# Altium footprint library Borisov.pcblib: 48 footprints (part 3 of 3)
Each footprint in its own frame and in the unit in brackets; x right, y up, seen from the top. Pads: shape width x height; smd on the part's side, far side on the other; paste and mask are expansions set on the pad; w line width, h text height; cw(c..) or ccw(c..) is an arc to the next point about the centre after c.
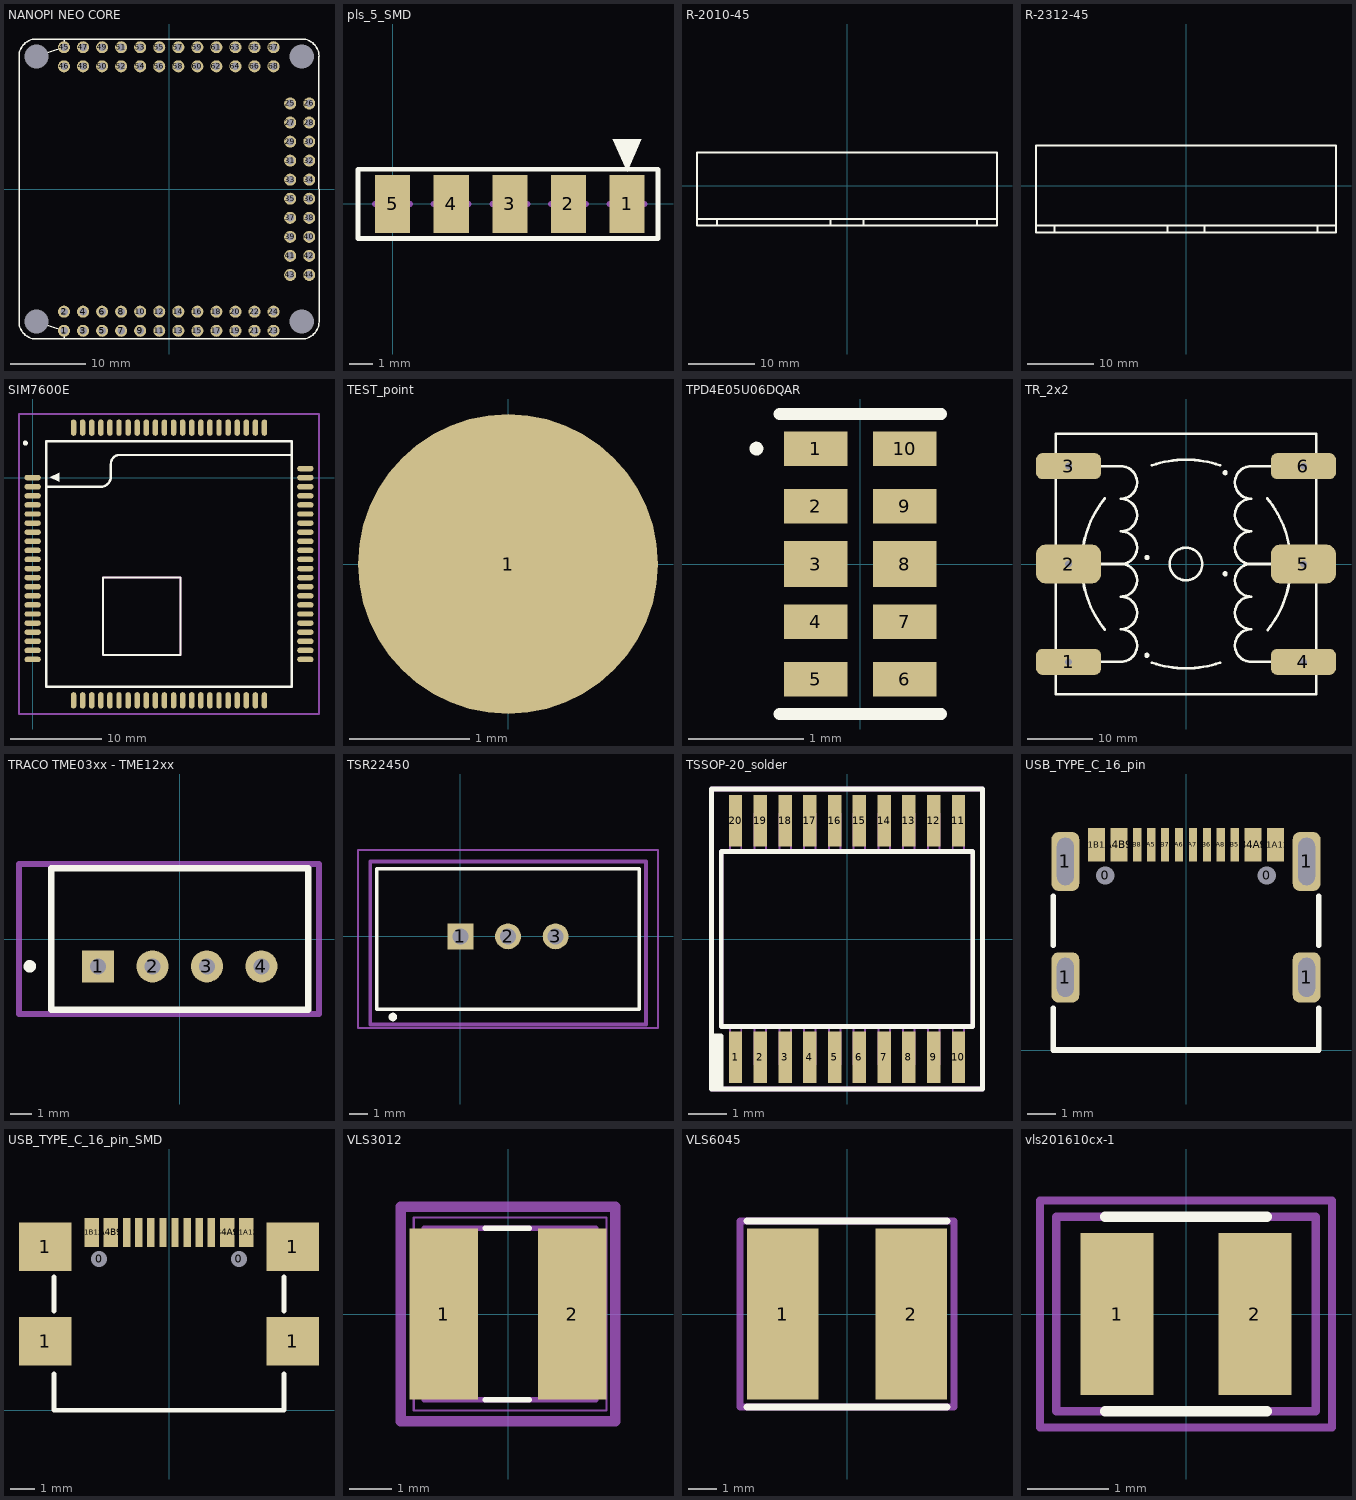
[diagram p2: the footprints below, top view; thin cyan lines are the x and y axes]

## NANOPI NEO CORE [mm]
height 15
pads (72):
  round 0 hole 3.2: 0(-17.7,-17.7) 0(-17.7,17.7) 0(17.7,-17.7) 0(17.7,17.7)
  round 1.6 hole 1: 1(-14,-18.9) 2(-14,-16.36) 3(-11.46,-18.9) 4(-11.46,-16.36) 5(-8.92,-18.9) 6(-8.92,-16.36) 7(-6.38,-18.9) 8(-6.38,-16.36) 9(-3.84,-18.9) 10(-3.84,-16.36) 11(-1.3,-18.9) 12(-1.3,-16.36) 13(1.24,-18.9) 14(1.24,-16.36) 15(3.78,-18.9) 16(3.78,-16.36) 17(6.32,-18.9) 18(6.32,-16.36) 19(8.86,-18.9) 20(8.86,-16.36) 21(11.4,-18.9) 22(11.4,-16.36) 23(13.94,-18.9) 24(13.94,-16.36) 25(16.16,11.4) 26(18.7,11.4) 27(16.16,8.86) 28(18.7,8.86) 29(16.16,6.32) 30(18.7,6.32) 31(16.16,3.78) 32(18.7,3.78) 33(16.16,1.24) 34(18.7,1.24) 35(16.16,-1.3) 36(18.7,-1.3) 37(16.16,-3.84) 38(18.7,-3.84) 39(16.16,-6.38) 40(18.7,-6.38) 41(16.16,-8.92) 42(18.7,-8.92) 43(16.16,-11.46) 44(18.7,-11.46) 45(-14,18.9) 46(-14,16.36) 47(-11.46,18.9) 48(-11.46,16.36) 49(-8.92,18.9) 50(-8.92,16.36) 51(-6.38,18.9) 52(-6.38,16.36) 53(-3.84,18.9) 54(-3.84,16.36) 55(-1.3,18.9) 56(-1.3,16.36) 57(1.24,18.9) 58(1.24,16.36) 59(3.78,18.9) 60(3.78,16.36) 61(6.32,18.9) 62(6.32,16.36) 63(8.86,18.9) 64(8.86,16.36) 65(11.4,18.9) 66(11.4,16.36) 67(13.94,18.9) 68(13.94,16.36)
Top Overlay:
  lines w0.2: -20,-17.8 -20,17.7 cw(c-17.7,17.7) -17.7,20 17.7,20 cw(c17.7,17.7) 20,17.7 20,-17.7 cw(c17.7,-17.7) 17.7,-20 -17.8,-20 ; -20,-17.7 ccw(c-17.7,-17.7) -17.7,-20 ; -17.7,-17.7 -14,-18.9 -14,-19.9 ; -17.7,17.7 -14,18.9 -14,19.97
3D body "Nano Pi Neo Core2.STEP": height 10.24, standoff 5.33, extent -20.372,-20 20,20

## pls_5_SMD [mm]
pads (5):
  rect 1.524x2.5 smd: 1(10.16,0) 2(7.62,0) 3(5.08,0) 4(2.54,0) 5(0,0)
Top Overlay:
  region: 10.16,1.397 10.771,2.794 9.549,2.794
  lines w0.2: -1.5,-1.5 -1.5,1.5 11.5,1.5 11.5,-1.5 -1.5,-1.5
Mechanical 5:
  lines w0.127: -0.305,-0.305 -0.305,0.305 ; -0.305,-0.305 0.305,-0.305 ; -0.305,-0.305 0.305,0.305 ; -0.305,0.305 0.305,0.305 ; -0.305,0.305 0.305,-0.305 ; 0.305,-0.305 0.305,0.305 ; 2.235,-0.305 2.845,0.305 ; 2.235,-0.305 2.845,-0.305 ; 2.235,-0.305 2.235,0.305 ; 2.235,0.305 2.845,-0.305 ; 2.235,0.305 2.845,0.305 ; 2.845,-0.305 2.845,0.305 ; 4.775,-0.305 5.385,0.305 ; 4.775,-0.305 5.385,-0.305 ; 4.775,-0.305 4.775,0.305 ; 4.775,0.305 5.385,-0.305 ; 4.775,0.305 5.385,0.305 ; 5.385,-0.305 5.385,0.305 ; 7.315,-0.305 7.315,0.305 ; 7.315,-0.305 7.925,-0.305 ; 7.315,-0.305 7.925,0.305 ; 7.315,0.305 7.925,0.305 ; 7.315,0.305 7.925,-0.305 ; 7.925,-0.305 7.925,0.305 ; 9.855,-0.305 10.465,0.305 ; 9.855,-0.305 10.465,-0.305 ; 9.855,-0.305 9.855,0.305 ; 9.855,0.305 10.465,-0.305 ; 9.855,0.305 10.465,0.305 ; 10.465,-0.305 10.465,0.305
Mechanical 25:
  lines w0.254: -0.762,0 0.762,0 ; 0,-0.762 0,0.762 ; 1.778,0 3.302,0 ; 2.54,-0.762 2.54,0.762 ; 4.318,0 5.842,0 ; 5.08,-0.762 5.08,0.762 ; 6.858,0 8.382,0 ; 7.62,-0.762 7.62,0.762 ; 9.398,0 10.922,0 ; 10.16,-0.762 10.16,0.762
Mechanical 26:
  lines w0.254: -0.762,0 0.762,0 ; 0,-0.762 0,0.762 ; 1.778,0 3.302,0 ; 2.54,-0.762 2.54,0.762 ; 4.318,0 5.842,0 ; 5.08,-0.762 5.08,0.762 ; 6.858,0 8.382,0 ; 7.62,-0.762 7.62,0.762 ; 9.398,0 10.922,0 ; 10.16,-0.762 10.16,0.762
3D body "PLS-5.step": height 1.59, standoff -0.95, extent -1.27,-10.1 11.43,1.5

## R-2010-45 [mm] "Аллюминиевый радиатор 20x10x45"
Top Overlay:
  lines w0.3: -19.5,-6 -19.5,-5 ; -2.5,-6 -2.5,-5 ; 2.5,-6 2.5,-5 ; 19.5,-6 19.5,-5 ; -22.5,-5 -22.5,-6 22.5,-6 22.5,-5 ; -22.5,-5 -22.5,5 22.5,5 22.5,-5 ; -22.5,-5 22.5,-5
3D body "ceramic_heat-conducting_gasket_17x1x22_TO-220.step": height 22, standoff 0, extent -19.5,-6 -2.5,-5
3D body "ceramic_heat-conducting_gasket_17x1x22_TO-220.step": height 22, standoff 0, extent 2.5,-6 19.5,-5
3D body "R-2010-45.step": height 20, standoff 0, extent -22.5,-5 22.5,5

## R-2312-45 [mm] "Аллюминиевый радиатор 22.77x12x45"
Top Overlay:
  lines w0.3: -19.75,-7 -19.75,-6 ; -2.75,-7 -2.75,-6 ; 2.75,-7 2.75,-6 ; 19.75,-7 19.75,-6 ; -22.5,-6 22.5,-6 ; -22.5,-6 -22.5,6 22.5,6 22.5,-6 ; -22.5,-6 -22.5,-7 22.5,-7 22.5,-6
3D body "R-2312-45.step": height 22, standoff 0, extent -22.5,-6 22.5,5.996
3D body "ceramic_heat-conducting_gasket_17x1x22_TO-220.step": height 22, standoff 0, extent 2.75,-7 19.75,-6
3D body "ceramic_heat-conducting_gasket_17x1x22_TO-220.step": height 22, standoff 0, extent -19.75,-7 -2.75,-6

## SIM7600E [mm] "Multi-Band LTE-TDD/LTE-FDD/HSPA+ and GSM/GPRS/EDGE module"
pads (87):
  oval 1.8x0.6 smd: 1(0,0) 2(0,-1) 3(0,-2) 4(0,-3) 5(0,-4) 6(0,-5) 7(0,-6) 8(0,-7) 9(0,-8) 10(0,-9) 11(0,-10) 12(0,-11) 13(0,-12) 14(0,-13) 15(0,-14) 16(0,-15) 17(0,-16) 18(0,-17) 19(0,-18) 20(0,-19) 41(30,-19) 42(30,-18) 43(30,-17) 44(30,-16) 45(30,-15) 46(30,-14) 47(30,-13) 48(30,-12) 49(30,-11) 50(30,-10) 51(30,-9) 52(30,-8) 53(30,-7) 54(30,-6) 55(30,-5) 56(30,-4) 57(30,-3) 58(30,-2) 59(30,-1) 60(30,0) 81(0,-20) 82(30,-20) 85(30,1)
  oval 0.6x1.8 smd: 21(5.5,-24.5) 22(6.5,-24.5) 23(7.5,-24.5) 24(8.5,-24.5) 25(9.5,-24.5) 26(10.5,-24.5) 27(11.5,-24.5) 28(12.5,-24.5) 29(13.5,-24.5) 30(14.5,-24.5) 31(15.5,-24.5) 32(16.5,-24.5) 33(17.5,-24.5) 34(18.5,-24.5) 35(19.5,-24.5) 36(20.5,-24.5) 37(21.5,-24.5) 38(22.5,-24.5) 39(23.5,-24.5) 40(24.5,-24.5) 61(24.5,5.5) 62(23.5,5.5) 63(22.5,5.5) 64(21.5,5.5) 65(20.5,5.5) 66(19.5,5.5) 67(18.5,5.5) 68(17.5,5.5) 69(16.5,5.5) 70(15.5,5.5) 71(14.5,5.5) 72(13.5,5.5) 73(12.5,5.5) 74(11.5,5.5) 75(10.5,5.5) 76(9.5,5.5) 77(8.5,5.5) 78(7.5,5.5) 79(6.5,5.5) 80(5.5,5.5) 83(25.5,-24.5) 84(4.5,-24.5) 86(4.5,5.5) 87(25.5,5.5)
Top Overlay:
  circle w0.254: c-0.8,3.8 r0.15
  region: 1.9,0.05 2.9,-0.45 2.9,0.55
  lines w0.2: 7.75,-19.5 16.25,-19.5 16.25,-11 7.75,-11 7.75,-19.5
  lines w0.254: 1.5,-1 7.5,-1 ccw(c7.5,0.1) 8.6,0.1 8.6,1.5 cw(c9.6,1.5) 9.6,2.5 11.8,2.5 28.4,2.5 ; 1.5,-23 28.5,-23 28.5,4 1.5,4 1.5,-23
Keep-Out Layer:
  lines w0.2: 7.75,-19.5 7.75,-11 16.25,-11 16.25,-19.5 7.75,-19.5
Board:
  lines w0.25: -1.5,-26 31.5,-26 31.5,7 -1.5,7 -1.5,-26
3D body "User Library-User Library-SIM7600C.step": height 3.17, standoff 0, extent 0,-24.5 30,5.5

## TEST_point [mm]
pads (1):
  round 2.5 smd: 1(0,0)

## TPD4E05U06DQAR [mm]
pads (10):
  rect 0.55x0.3 smd: 1(-0.385,1) 2(-0.385,0.5) 4(-0.385,-0.5) 5(-0.385,-1) 6(0.385,-1) 7(0.385,-0.5) 9(0.385,0.5) 10(0.385,1)
  rect 0.55x0.4 smd: 3(-0.385,0) 8(0.385,0)
Top Overlay:
  circle w0.06: c-0.9,1 r0.03
  lines w0.1: -0.7,-1.3 0.7,-1.3 ; -0.7,1.3 0.7,1.3
3D body "TPD4E05U06DQAR.stp": height 0.53, standoff 0, extent -0.5,-1.25 0.5,1.25

## TR_2x2 [mm]
pads (6):
  rrect50% 10x4 hole 1.05: 1(-18,-15) 3(-18,15) 4(18,-15) 6(18,15)
  rrect50% 10x6 hole 1.05: 2(-18,0) 5(18,0)
Top Overlay:
  circle w0.4: c0,0 r2.5
  circle w0.4: c-6,-14 r0.2
  circle w0.4: c-6,1 r0.2
  circle w0.4: c6,14 r0.2
  circle w0.4: c6,-1.5 r0.2
  lines w0.4: -20,-15 -10,-15 ccw(c-10,-12.5) -10,-10 ccw(c-10,-7.5) -10,-5 ccw(c-10,-2.5) -10,0 ; -20,0 -10,0 ; -20,15 -10,15 cw(c-10,12.5) -10,10 cw(c-10,7.5) -10,5 cw(c-10,2.5) -10,0 ; -12.447,-10.053 cw(c0,0) -12.447,10.053 ; -5.216,-15.126 ccw(c0,0) 5.216,-15.126 ; -5.216,15.126 cw(c0,0) 5.216,15.126 ; 12.465,10.063 cw(c0.073,-0.059) 12.52,-10.112 ; 20,-15 10,-15 cw(c10,-12.5) 10,-10 cw(c10,-7.5) 10,-5 cw(c10,-2.5) 10,0 ; 20,0 10,0 ; 20,15 10,15 ccw(c10,12.5) 10,10 ccw(c10,7.5) 10,5 ccw(c10,2.5) 10,0 ; -20,-20 20,-20 20,20 -20,20 -20,-20
3D body "TR_2x2.step": height 15, standoff -4, extent -18.5,-15.982 18.5,15.982

## TRACO TME03xx - TME12xx [mm] "DC/DC"
pads (4):
  rect 1.5x1.5 hole 0.75: 1(-3.81,-1.275)
  round 1.5 hole 0.75: 2(-1.27,-1.275) 3(1.27,-1.275) 4(3.81,-1.275)
Top Overlay:
  circle w0.3: c-7,-1.275 r0.14
  lines w0.3: -6,-3.3 6,-3.3 6,3.3 -6,3.3 -6,-3.3
Board:
  lines w0.3: -7.5,-3.5 -7.5,3.5 6.5,3.5 6.5,-3.5 -7.5,-3.5
3D body "TRACO TME03xx - TME12xx.step": height 10.2, standoff -3.2, extent -5.75,-3.055 5.75,3.05

## TSR22450 [mm] "DC/DC; Vin: 6.5-36V; Vout: 5V"
pads (3):
  rect 1.381x1.381 hole 0.85: 1(0,0)
  round 1.381 hole 0.85: 2(2.54,0) 3(5.08,0)
Top Overlay:
  circle w0.254: c-3.6,-4.3 r0.1
  lines w0.2: -4.46,-3.89 9.54,-3.89 9.54,3.61 -4.46,3.61 -4.46,-3.89
Mechanical 15:
  lines w0.1: -4.46,-3.89 9.54,-3.89 9.54,3.61 -4.46,3.61 -4.46,-3.89
  lines w0.2: -4.8,-4.7 -4.8,4 9.9,4 9.9,-4.7 -4.8,-4.7
Bottom Assembly:
  lines w0.1: -5.46,-4.89 10.54,-4.89 10.54,4.61 -5.46,4.61 -5.46,-4.89
3D body "TSR 2-2450.stp": height 10.12, standoff -4.08, extent -4.475,-3.9 9.525,3.6

## TSSOP-20_solder [mm]
pads (20):
  rect 0.35x1.35 smd: 1(-2.925,-3.1) 2(-2.275,-3.1) 3(-1.625,-3.1) 4(-0.975,-3.1) 5(-0.325,-3.1) 6(0.325,-3.1) 7(0.975,-3.1) 8(1.625,-3.1) 9(2.275,-3.1) 10(2.925,-3.1) 11(2.925,3.1) 12(2.275,3.1) 13(1.625,3.1) 14(0.975,3.1) 15(0.325,3.1) 16(-0.325,3.1) 17(-0.975,3.1) 18(-1.625,3.1) 19(-2.275,3.1) 20(-2.925,3.1)
Top Overlay:
  lines w0.127: -3.54,-2.55 -3.303,-2.55 -3.303,-3.937 ; -3.43,-3.937 -3.43,-2.55 ; -3.556,-3.937 3.556,-3.937 3.556,3.937 -3.556,3.937 -3.556,-3.937 ; -3.3,-2.3 3.3,-2.3 3.3,2.3 -3.3,2.3 -3.3,-2.3
Mechanical 5:
  lines w0.051: -3.075,-2.725 -2.775,-2.725 ; -3.075,-2.55 -2.775,-2.55 ; -3.075,-2.3 -3.075,-3.3 -2.775,-3.3 -2.775,-2.3 ; -3.075,2.3 -3.075,3.3 -2.775,3.3 -2.775,2.3 ; -3.075,2.55 -2.775,2.55 ; -3.075,2.725 -2.775,2.725 ; -2.425,2.3 -2.425,3.3 -2.125,3.3 -2.125,2.3 ; -2.425,2.55 -2.125,2.55 ; -2.425,2.725 -2.125,2.725 ; -2.425,-2.725 -2.125,-2.725 ; -2.425,-2.55 -2.125,-2.55 ; -2.425,-2.3 -2.425,-3.3 -2.125,-3.3 -2.125,-2.3 ; -1.775,2.3 -1.775,3.3 -1.475,3.3 -1.475,2.3 ; -1.775,2.55 -1.475,2.55 ; -1.775,2.725 -1.475,2.725 ; -1.775,-2.725 -1.475,-2.725 ; -1.775,-2.55 -1.475,-2.55 ; -1.775,-2.3 -1.775,-3.3 -1.475,-3.3 -1.475,-2.3 ; -1.125,-2.725 -0.825,-2.725 ; -1.125,-2.55 -0.825,-2.55 ; -1.125,-2.3 -1.125,-3.3 -0.825,-3.3 -0.825,-2.3 ; -1.125,2.3 -1.125,3.3 -0.825,3.3 -0.825,2.3 ; -1.125,2.55 -0.825,2.55 ; -1.125,2.725 -0.825,2.725 ; -0.475,-2.725 -0.175,-2.725 ; -0.475,-2.55 -0.175,-2.55 ; -0.475,-2.3 -0.475,-3.3 -0.175,-3.3 -0.175,-2.3 ; -0.475,2.3 -0.475,3.3 -0.175,3.3 -0.175,2.3 ; -0.475,2.55 -0.175,2.55 ; -0.475,2.725 -0.175,2.725 ; 0.175,-2.725 0.475,-2.725 ; 0.175,-2.55 0.475,-2.55 ; 0.175,-2.3 0.175,-3.3 0.475,-3.3 0.475,-2.3 ; 0.175,2.3 0.175,3.3 0.475,3.3 0.475,2.3 ; 0.175,2.55 0.475,2.55 ; 0.175,2.725 0.475,2.725 ; 0.825,2.3 0.825,3.3 1.125,3.3 1.125,2.3 ; 0.825,2.55 1.125,2.55 ; 0.825,2.725 1.125,2.725 ; 0.825,-2.725 1.125,-2.725 ; 0.825,-2.55 1.125,-2.55 ; 0.825,-2.3 0.825,-3.3 1.125,-3.3 1.125,-2.3 ; 1.475,2.3 1.475,3.3 1.775,3.3 1.775,2.3 ; 1.475,2.55 1.775,2.55 ; 1.475,2.725 1.775,2.725 ; 1.475,-2.725 1.775,-2.725 ; 1.475,-2.55 1.775,-2.55 ; 1.475,-2.3 1.475,-3.3 1.775,-3.3 1.775,-2.3 ; 2.125,2.3 2.125,3.3 2.425,3.3 2.425,2.3 ; 2.125,2.55 2.425,2.55 ; 2.125,2.725 2.425,2.725 ; 2.125,-2.725 2.425,-2.725 ; 2.125,-2.55 2.425,-2.55 ; 2.125,-2.3 2.125,-3.3 2.425,-3.3 2.425,-2.3 ; 2.775,-2.725 3.075,-2.725 ; 2.775,-2.55 3.075,-2.55 ; 2.775,-2.3 2.775,-3.3 3.075,-3.3 3.075,-2.3 ; 2.776,2.3 2.776,3.3 3.076,3.3 3.076,2.3 ; 2.776,2.55 3.076,2.55 ; 2.776,2.725 3.076,2.725
  lines w0.127: -3.3,-2.3 -3.3,2.3 3.3,2.3 3.3,-2.3 -3.3,-2.3
Mechanical 15:
  lines w0.127: -3.556,-3.937 -3.556,3.937 3.556,3.937 3.556,-3.937 -3.556,-3.937
3D body "TSSOP-20.STEP": height 1.2, standoff 0, extent -3.3,-3.2 3.3,3.2

## USB_TYPE_C_16_pin [mm] "USB TYPE-C 16 pin"
pads (18):
  round 0.6 hole 0.65: 0(-2.89,6.25) 0(2.89,6.25)
  rrect50% 1x1.8 hole 0.6 slot 1.4 at 90 deg: 1(-4.32,2.6) 1(4.32,2.6)
  rrect50% 1x2.1 hole 0.6 slot 1.7 at 90 deg: 1(-4.32,6.75) 1(4.32,6.75)
  rect 0.6x1.2 smd: A1B12(-3.2,7.35) A4B9(-2.4,7.35) B1A12(3.2,7.35) B4A9(2.4,7.35)
  rect 0.3x1.2 smd: A5(-1.25,7.35) A6(-0.25,7.35) A7(0.25,7.35) A8(1.25,7.35) B5(1.75,7.35) B6(0.75,7.35) B7(-0.75,7.35) B8(-1.75,7.35)
Top Overlay:
  lines w0.2: -4.75,1.5 -4.75,0 4.75,0 4.75,1.5 ; -4.75,3.75 -4.75,5.5 ; 4.75,3.75 4.75,5.5
3D body "CMUCF661030E.stp": height 3.24, standoff -0.72, extent -4.5,0 4.5,7.73

## USB_TYPE_C_16_pin_SMD [mm] "USB TYPE-C 16 pin SMD"
pads (18):
  round 0.6 hole 0.65: 0(-2.89,6.25) 0(2.89,6.25)
  rect 2.18x2 smd: 1(-5.11,2.85) 1(-5.11,6.75) 1(5.11,2.85) 1(5.11,6.75)
  rect 0.6x1.2 smd: A1B12(-3.2,7.35) A4B9(-2.4,7.35) B1A12(3.2,7.35) B4A9(2.4,7.35)
  rect 0.3x1.2 smd: A5(-1.25,7.35) A6(-0.25,7.35) A7(0.25,7.35) A8(1.25,7.35) B5(1.75,7.35) B6(0.75,7.35) B7(-0.75,7.35) B8(-1.75,7.35)
Top Overlay:
  lines w0.2: -4.75,1.5 -4.75,0 4.75,0 4.75,1.5 ; -4.75,4.1 -4.75,5.5 ; 4.75,4.1 4.75,5.5
3D body "CMUCF6610201 3D.stp": height 3.18, standoff -0.7, extent -5.67,0 5.67,7.598

## VLS3012 [mm]
pads (2):
  rect 1.6x4 smd: 1(-1.5,0) 2(1.5,0)
Top Overlay:
  lines w0.127: -0.53,-2 0.5,-2 ; -0.53,2 0.5,2
Board:
  lines w0.25: -2.5,-2.5 -2.5,2.5 2.5,2.5 2.5,-2.5 -2.5,-2.5
Mechanical 13:
  lines w0.127: -1.95,-2 2.05,-2 2.05,2 -1.95,2 -1.95,-2
Mechanical 15:
  lines w0.05: -2.2,-2.25 2.3,-2.25 2.3,2.25 -2.2,2.25 -2.2,-2.25
3D body "step_temp.STEP": height 1.2, standoff 0, extent -2,-2 2,2

## VLS6045 [mm]
pads (2):
  rect 2.5x6 smd: 1(-2.25,0) 2(2.25,0)
Top Overlay:
  lines w0.25: -3.5,-3.25 3.5,-3.25 ; -3.5,3.25 3.5,3.25
Board:
  lines w0.25: -3.75,-3.25 -3.75,3.25 3.75,3.25 3.75,-3.25 -3.75,-3.25
3D body "VLS6045EX-150M.stp": height 4.49, standoff -0.01, extent -3,-3 3,3

## vls201610cx-1 [mm] "Индуктивность SMD"
pads (2):
  rect 0.9x2 smd: 1(-0.85,0) 2(0.85,0)
Top Overlay:
  lines w0.127: -1,-1.2 1,-1.2 ; -1,1.2 1,1.2
Board:
  lines w0.1: -1.8,-1.4 1.8,-1.4 1.8,1.4 -1.8,1.4 -1.8,-1.4
Mechanical 13:
  lines w0.1: -1.6,-1.2 1.6,-1.2 1.6,1.2 -1.6,1.2 -1.6,-1.2
3D body "vls201610cx-1.step": height 1, standoff 0, extent -1,-0.81 1,0.79